# Altium footprint library DC-005_5521.PcbLib: 1 footprints
Each footprint in its own frame and in the unit in brackets; x right, y up, seen from the top. Pads: shape width x height; smd on the part's side, far side on the other; paste and mask are expansions set on the pad; w line width, h text height; cw(c..) or ccw(c..) is an arc to the next point about the centre after c.
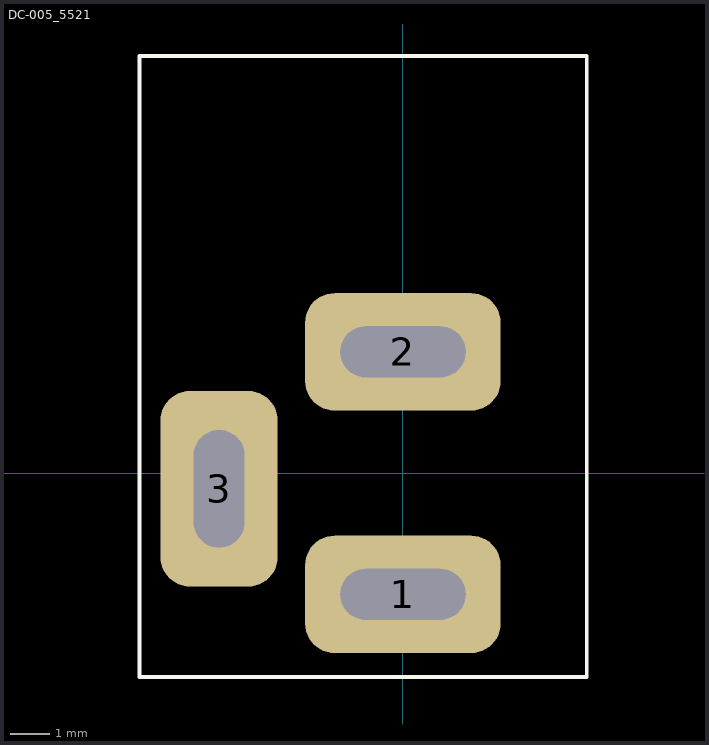
[diagram p0: the footprint, top view; thin cyan lines are the x and y axes]

## DC-005_5521 [mm] "Female Jack DC-005 5.5x2.1mm"
pads (3):
  rrect50% 5x3 hole 1.3 slot 3.2 at 0 deg: 1(0,-3.1) 2(0,3.1)
  rrect50% 3x5 hole 1.3 slot 3 at 90 deg: 3(-4.7,-0.4)
Top Overlay:
  lines w0.1: -6.731,-5.207 4.699,-5.207 4.699,10.668 -6.731,10.668 -6.731,-5.207
3D body "DC-005_55x21mm.stp": height 11, standoff -4.09, extent -4.95,-3.671 4.5,10.529